# EAGLE library part PCF85063AT/AY (library astra)
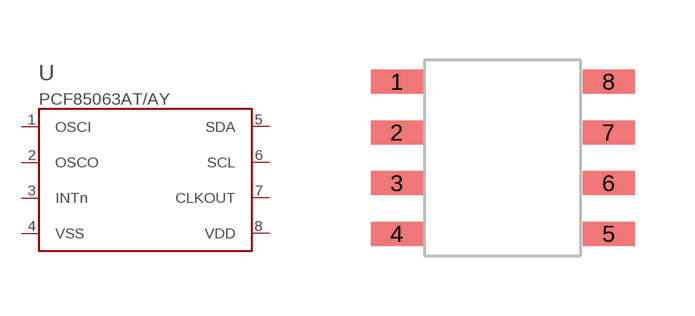
[diagram p11: symbol with the pads of NXP_SO8_RTC; footprint NXP_SO8_RTC]

Designator prefix U

## PCF85063AT/AY  [NXP_SO8_RTC]
1  OSCI  in
2  OSCO  out
3  INTn  oc
4  VSS  pwr
5  SDA
6  SCL  in
7  CLKOUT  out
8  VDD  pwr

## Footprint NXP_SO8_RTC (pad centres in mm)
NXP SOT96-1 / Nexperia SOT96-1, Fig 2. Land toe span 6.60 mm, heel gap 4.00 mm.
smd 1.3 x 0.6: 1 -2.65,1.905; 2 -2.65,0.635; 3 -2.65,-0.635; 4 -2.65,-1.905; 5 2.65,-1.905; 6 2.65,-0.635; 7 2.65,0.635; 8 2.65,1.905